# Altium integrated library INMP441ACEZ-R7.IntLib: 1 symbol
Pins are listed as number, name and electrical type; pins without a type are passive.

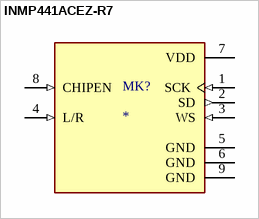
[diagram p0: symbol INMP441ACEZ-R7]

## INMP441ACEZ-R7
designator MK?
60 Hz ~ 15 kHz Digital, I2S Microphone MEMS (Silicon) 1.62 V ~ 3.63 V Omnidirectional (-26dB Â±3dB @ 94dB SPL) Solder Pads; MF: TDK InvenSense; MP: INMP441ACEZ-R7; SnapEDA_Link: https://www.snapeda.com/parts/INMP441ACEZ-R7/TDK/view-part/?ref=snap; Package: LGA-9 TDK InvenSense; Value: *; Check_prices: https://www.snapeda.com/parts/INMP441ACEZ-R7/TDK/view-part/?ref=eda
footprint MIC_INMP441ACEZ-R7
pins: 1 SCK (in), 2 SD (out), 3 WS (in), 4 L/R (in), 5 GND (power), 6 GND (power), 7 VDD (power), 8 CHIPEN (in), 9 GND (power)